# Altium schematic symbol library 22232031.SchLib: 1 symbol
Pins are listed as number, name and electrical type; pins without a type are passive.

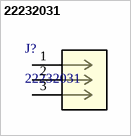
[diagram p0: symbol 22232031]

## 22232031
designator J?
KK 254 Solid Header, Vertical, with Friction Lock, 3 Circuits, Tin (Sn) Plating, Bag; Manufacturer_Name: Molex Connector Corporation; Copyright: Copyright (C) 2025 Ultra Librarian. All rights reserved.; Manufacturer_Part_Number: 22232031; RefDes: RefDes; Type: Type
footprint CONN_A-6373-03A_MOL
pins: 1, 2, 3